# Altium schematic symbol library Turret.SCHLIB: 26 symbols
Pins are listed as number, name and electrical type; pins without a type are passive.

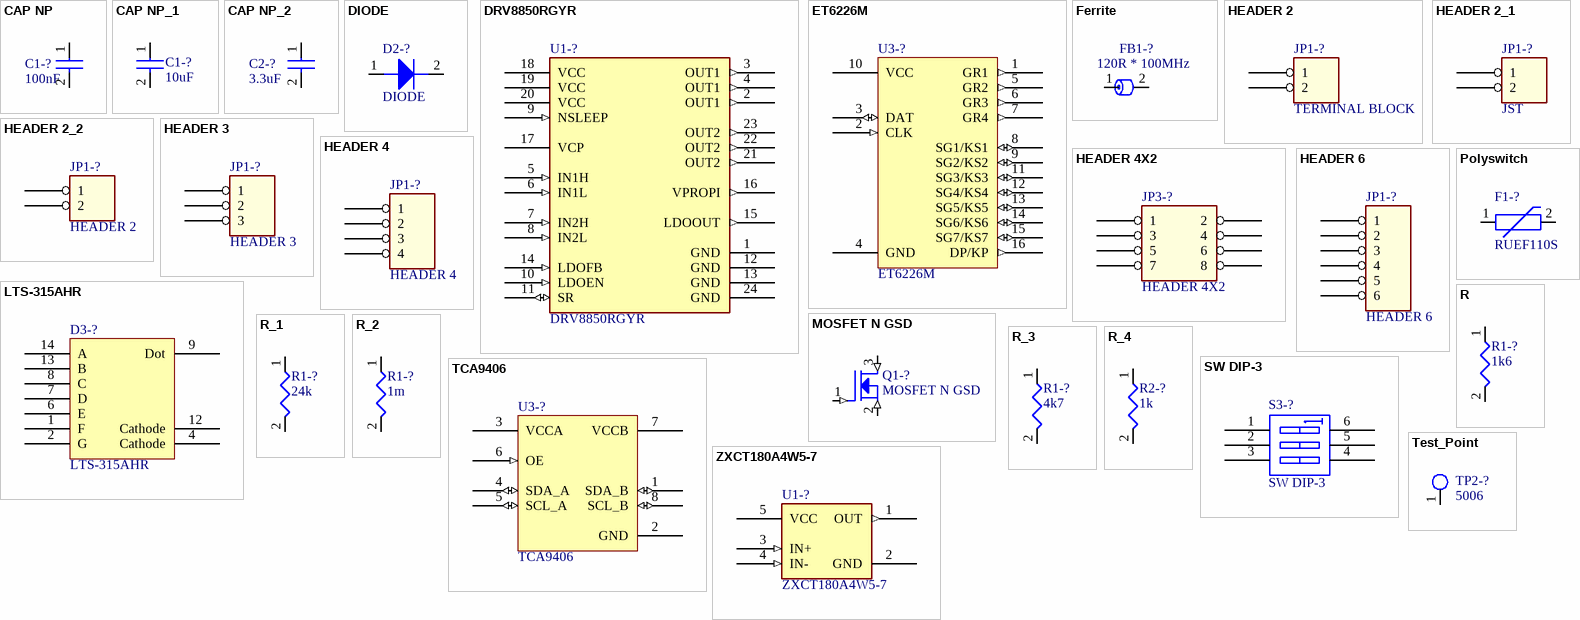
[diagram p0: symbols CAP NP to ZXCT180A4W5-7]

## CAP NP
designator C1-?, comment 100nF
footprint CAP_0603
pins: 1, 2

## CAP NP_1
designator C1-?, comment 10uF
footprint CAP_0603
pins: 1, 2

## CAP NP_2
designator C2-?, comment 3.3uF
footprint CAP_0603
pins: 1, 2

## DIODE
designator D2-?
footprint CD214A-B160R
pins: 1 ANODE, 2 CATHODE

## DRV8850RGYR
designator U1-?
No Description Available; Mfr_Name: Texas Instruments; RefDes: RefDes; Type: Type
footprint RGY_24
footprint DRV8850
pins: 1 GND (power), 2 OUT1 (out), 3 OUT1 (out), 4 OUT1 (out), 5 IN1H (in), 6 IN1L (in), 7 IN2H (in), 8 IN2L (in), 9 NSLEEP (in), 10 LDOEN (in), 11 SR (io), 12 GND (power), 13 GND (power), 14 LDOFB (in), 15 LDOOUT (out), 16 VPROPI (out), 17 VCP, 18 VCC (power), 19 VCC (power), 20 VCC (power), 21 OUT2 (out), 22 OUT2 (out), 23 OUT2 (out), 24 GND (power)

## ET6226M
designator U3-?
footprint ET6226M (TSOP, 16-Leads, Body 10,00x3,95mm, Pitch 1,27mm, IPC Medium Density)
pins: 1 GR1 (out), 2 CLK (in), 3 DAT (io), 4 GND (power), 5 GR2 (out), 6 GR3 (out), 7 GR4 (out), 8 SG1/KS1 (io), 9 SG2/KS2 (io), 10 VCC (power), 11 SG3/KS3 (io), 12 SG4/KS4 (io), 13 SG5/KS5 (io), 14 SG6/KS6 (io), 15 SG7/KS7 (io), 16 DP/KP (out)

## Ferrite
designator FB1-?, comment 120R * 100MHz
footprint MFBM1V3216-121-R
pins: 1 3, 2 10

## HEADER 2
designator JP1-?, comment TERMINAL BLOCK
footprint TB005-762-02BE
pins: 1, 2

## HEADER 2_1
designator JP1-?, comment JST
footprint B2B-PH-K-S
pins: 1, 2

## HEADER 2_2
designator JP1-?, comment HEADER 2
footprint Header_2
pins: 1, 2

## HEADER 3
designator JP1-?
footprint Header_3
pins: 1, 2, 3

## HEADER 4
designator JP1-?
footprint Header_4
pins: 1, 2, 3, 4

## HEADER 4X2
designator JP3-?
footprint Header_2x4
pins: 1, 2, 3, 4, 5, 6, 7, 8

## HEADER 6
designator JP1-?
footprint Header_6
pins: 1, 2, 3, 4, 5, 6

## LTS-315AHR
designator D3-?
footprint LTS-315AHR
pins: 1 F, 2 G, 4 Cathode, 6 E, 7 D, 8 C, 9 Dot, 12 Cathode, 13 B, 14 A

## MOSFET N GSD
designator Q1-?
footprint GSFC2312 (SOT23, 3-Leads, Body 2,90x2,40mm, Pitch 0,95mm, IPC Medium Density)
pins: 1 GATE (in), 2 SOURCE (in), 3 DRAIN (in)

## Polyswitch
designator F1-?, comment RUEF110S
footprint MINISMDC110F/24-2
pins: 1 17, 2 18

## R
designator R1-?, comment 1k6
footprint RES_0603
pins: 1, 2

## R_1
designator R1-?, comment 24k
footprint RES_0603
pins: 1, 2

## R_2
designator R1-?, comment 1m
footprint RES_1206 (Chip Resistor, 2-Leads, Body 3,20x1,60mm, IPC Medium Density)
pins: 1, 2

## R_3
designator R1-?, comment 4k7
footprint RES_0603
pins: 1, 2

## R_4
designator R2-?, comment 1k
footprint RES_0603
pins: 1, 2

## SW DIP-3
designator S3-?
footprint 219-3LPST
pins: 1 A1, 2 A2, 3 A3, 4 B3, 5 B2, 6 B1

## TCA9406
designator U3-?
footprint TCA9406
pins: 1 SDA_B (io), 2 GND (power), 3 VCCA (power), 4 SDA_A (io), 5 SCL_A (io), 6 OE (in), 7 VCCB (power), 8 SCL_B (io)

## Test_Point
designator TP2-?, comment 5006
footprint TestPoint
pins: 1

## ZXCT180A4W5-7
designator U1-?
footprint ZXCT180A4W5-7 (SOT23, 5-Leads, Body 3,00x2,85mm, Pitch 0,95mm, IPC Medium Density)
pins: 1 OUT (out), 2 GND (power), 3 IN+ (in), 4 IN- (in), 5 VCC (power)